# Altium footprint library Vibration_Datalogger.PcbLib: 76 footprints (part 5 of 5)
Each footprint in its own frame and in the unit in brackets; x right, y up, seen from the top. Pads: shape width x height; smd on the part's side, far side on the other; paste and mask are expansions set on the pad; w line width, h text height; cw(c..) or ccw(c..) is an arc to the next point about the centre after c.
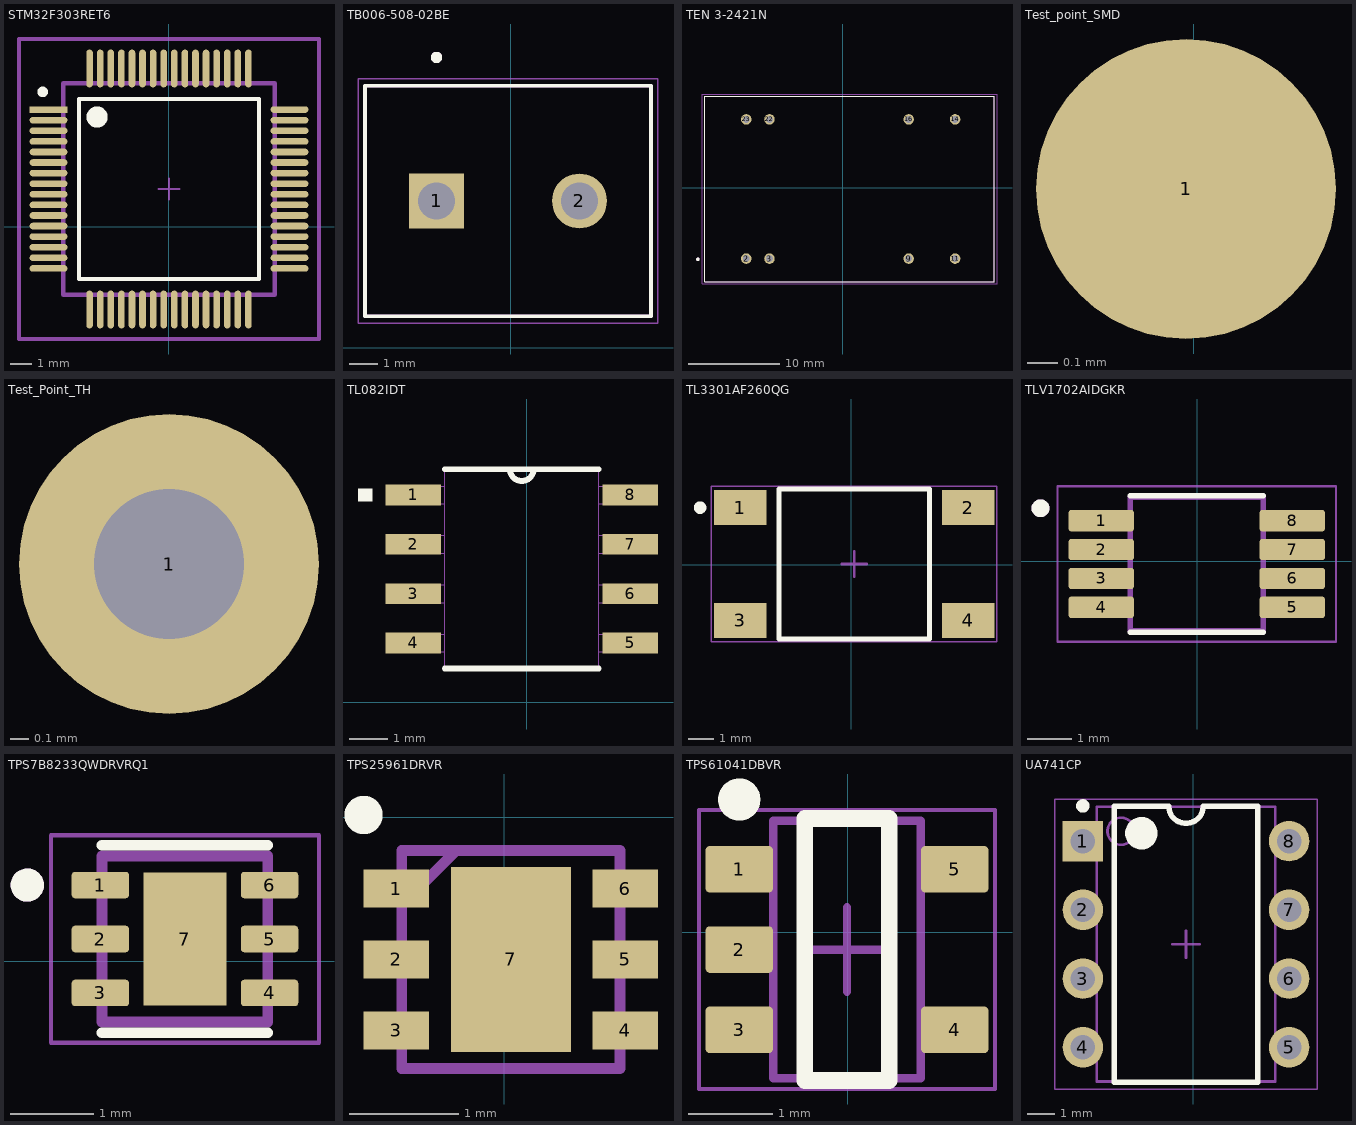
[diagram p4: the footprints below, top view; thin cyan lines are the x and y axes]

## STM32F303RET6 [mm]
pads (64):
  rect 1.788x0.312 smd paste+0 mask+0: 1(-5.683,5.543)
  rrect100% 1.788x0.312 smd paste+0 mask+0: 2(-5.683,5.043) 3(-5.683,4.543) 4(-5.683,4.043) 5(-5.683,3.543) 6(-5.683,3.043) 7(-5.683,2.543) 8(-5.683,2.043) 9(-5.683,1.543) 10(-5.683,1.043) 11(-5.683,0.543) 12(-5.683,0.043) 13(-5.683,-0.457) 14(-5.683,-0.957) 15(-5.683,-1.457) 16(-5.683,-1.957) 33(5.699,-1.957) 34(5.699,-1.457) 35(5.699,-0.957) 36(5.699,-0.457) 37(5.699,0.043) 38(5.699,0.543) 39(5.699,1.043) 40(5.699,1.543) 41(5.699,2.043) 42(5.699,2.543) 43(5.699,3.043) 44(5.699,3.543) 45(5.699,4.043) 46(5.699,4.543) 47(5.699,5.043) 48(5.699,5.543)
  rrect100% 0.312x1.788 smd paste+0 mask+0: 17(-3.742,-3.898) 18(-3.242,-3.898) 19(-2.742,-3.898) 20(-2.242,-3.898) 21(-1.742,-3.898) 22(-1.242,-3.898) 23(-0.742,-3.898) 24(-0.242,-3.898) 25(0.258,-3.898) 26(0.758,-3.898) 27(1.258,-3.898) 28(1.758,-3.898) 29(2.258,-3.898) 30(2.758,-3.898) 31(3.258,-3.898) 32(3.758,-3.898) 49(3.758,7.484) 50(3.258,7.484) 51(2.758,7.484) 52(2.258,7.484) 53(1.758,7.484) 54(1.258,7.484) 55(0.758,7.484) 56(0.258,7.484) 57(-0.242,7.484) 58(-0.742,7.484) 59(-1.242,7.484) 60(-1.742,7.484) 61(-2.242,7.484) 62(-2.742,7.484) 63(-3.242,7.484) 64(-3.742,7.484)
Top Overlay:
  circle w0.25: c-5.958,6.378 r0.125
  circle w0.5: c-3.392,5.193 r0.25
  lines w0.2: -4.242,-2.457 4.258,-2.457 4.258,6.043 -4.242,6.043 -4.242,-2.457
Mechanical 5:
  lines w0.2: -7.077,-5.292 7.093,-5.292 7.093,8.878 -7.077,8.878 -7.077,-5.292
  text ".Designator" at 0.008,1.792 h1
Mechanical 13:
  lines w0.2: -4.992,-3.207 5.008,-3.207 5.008,6.793 -4.992,6.793 -4.992,-3.207
Mechanical 15:
  lines w0.2: -7.077,-5.292 7.093,-5.292 7.093,8.878 -7.077,8.878 -7.077,-5.292
Mechanical 16:
  lines w0.1: -0.492,1.793 0.508,1.793 ; 0.008,1.293 0.008,2.293
3D body "IC_STMicroelectronics_STM32F303RET6_eec.STEP": height 0.25, standoff 0, extent -7.077,-5.292 7.093,8.878

## TB006-508-02BE [mm] "Borniers fixes Terminal block, screw type, 5.08"
pads (2):
  rect 1.95x1.95 / inner round 1.95 / far side rect 1.95x1.95 hole 1.3: 1(-2.644,5.208)
  round 1.95 hole 1.3: 2(2.436,5.208)
Top Overlay:
  circle w0.2: c-2.644,10.308 r0.1
  lines w0.127: -5.184,1.108 4.976,1.108 4.976,9.308 -5.184,9.308 -5.184,1.108
Mechanical 13:
  circle w0.2: c-2.644,10.308 r0.1
  lines w0.127: -5.184,1.108 4.976,1.108 4.976,9.308 -5.184,9.308 -5.184,1.108
Mechanical 15:
  lines w0.05: -5.434,0.858 -5.434,9.558 5.226,9.558 5.226,0.858 -5.434,0.858
3D body "step_temp.STEP": height 10.48, standoff -3.32, extent -5.561,1.017 5.099,9.217

## TEN 3-2421N [mm] "DC DC CONVERTER +/-5V 2.5W"
pads (8):
  round 1.15 hole 0.75: 2(-10.541,-7.747) 3(-8.001,-7.747) 9(7.239,-7.747) 11(12.319,-7.747) 14(12.319,7.493) 16(7.239,7.493) 22(-8.001,7.493) 23(-10.541,7.493)
Top Overlay:
  circle w0.2: c-15.838,-7.827 r0.1
  lines w0.127: -15.113,-10.287 -15.113,10.033 16.637,10.033 16.637,-10.287 -15.113,-10.287
Mechanical 13:
  circle w0.2: c-15.838,-7.827 r0.1
  lines w0.127: -15.113,-10.287 -15.113,10.033 16.637,10.033 16.637,-10.287 -15.113,-10.287
Mechanical 15:
  lines w0.05: -15.388,-10.527 16.912,-10.527 16.912,10.273 -15.388,10.273 -15.388,-10.527
3D body "TEN 3-2421N.STEP": height 10.2, standoff -4.5, extent -14.884,-10.15 16.916,10.15

## Test_point_SMD [mm]
pads (1):
  round 1 smd: 1(-0.027,2.283)

## Test_Point_TH [mm]
pads (1):
  round 1.6 hole 0.8: 1(3.588,48.418)

## TL082IDT [mil] "J-FET Amplifier 2 Circuit - 8-SOIC"
pads (8):
  rect 56x21 smd: 1(-115,210) 2(-115,160) 3(-115,110) 4(-115,60) 5(105,60) 6(105,110) 7(105,160) 8(105,210)
Top Overlay:
  rectangle: -170.87,203.15 -156.3,216.54
  lines w6: -83,34 73,34 ; -83,236 -17,236 ; 73,236 7,236 ; -17,236 ccw(c-5,236) 7,236 ; -17,236 7,236
Mechanical 13:
  lines w0: -17,236 ccw(c-5,236) 7,236 ; -17,236 -83,236 -83,34 73,34 73,236 7,236 ; -17,236 7,236 ; -129,51 -83,51 -83,69 -129,69 -129,51 ; -129,101 -83,101 -83,119 -129,119 -129,101 ; -129,151 -83,151 -83,169 -129,169 -129,151 ; -129,201 -83,201 -83,219 -129,219 -129,201 ; 73,51 119,51 119,69 73,69 73,51 ; 73,101 119,101 119,119 73,119 73,101 ; 73,151 119,151 119,169 73,169 73,151 ; 73,201 119,201 119,219 73,219 73,201
3D body "step_temp.STEP": height 68.9, standoff 0, extent -123.11,38.54 113.11,231.46

## TL3301AF260QG [mm] "SWITCH TACTILE SPST-NO 0.05A 12V"
pads (4):
  rect 2.1x1.4 smd: 1(-4.434,2.277) 2(4.666,2.277) 3(-4.434,-2.223) 4(4.666,-2.223)
Top Overlay:
  circle w0.25: c-6.034,2.277 r0.125
  lines w0.2: -2.884,-2.973 3.116,-2.973 3.116,3.027 -2.884,3.027 -2.884,-2.973
Mechanical 13:
  lines w0.1: -2.884,-2.973 -2.884,3.027 3.116,3.027 3.116,-2.973 -2.884,-2.973
Mechanical 15:
  lines w0.05: -5.584,-3.073 5.816,-3.073 5.816,3.127 -5.584,3.127 -5.584,-3.073
  lines w0.1: -0.384,0.027 0.616,0.027 ; 0.116,-0.473 0.116,0.527
3D body: height 5.3, standoff 3.6, extent -1.634,-1.723 1.866,1.777
3D body: height 3.6, standoff 0, extent -2.884,-2.973 3.116,3.027

## TLV1702AIDGKR [mm] "IC COMPARATOR 2CH 8-VSSOP"
pads (8):
  rrect25% 1.47x0.48 smd paste+0 mask+0.102: 1(-2.162,0.916) 2(-2.162,0.266) 3(-2.162,-0.384) 4(-2.162,-1.034) 5(2.138,-1.034) 6(2.138,-0.384) 7(2.138,0.266) 8(2.138,0.916)
Top Overlay:
  circle w0.2: c-3.532,1.196 r0.1
  lines w0.127: -1.512,-1.594 1.488,-1.594 ; -1.512,1.476 1.488,1.476
Mechanical 13:
  circle w0.2: c-3.532,1.196 r0.1
  lines w0.127: -1.512,-1.559 -1.512,1.441 1.488,1.441 1.488,-1.559 -1.512,-1.559
Mechanical 15:
  lines w0.05: -3.147,-1.809 -3.147,1.691 3.123,1.691 3.123,-1.809 -3.147,-1.809
3D body "step_temp.STEP": height 1.1, standoff 0, extent -2.462,-1.559 2.438,1.441

## TPS7B8233QWDRVRQ1 [mm] "AUTOMOTIVE 300-MA, OFF-BATTERY ("
pads (7):
  rrect25% 0.69x0.32 smd: 1(-3.546,0.92) 2(-3.546,0.27) 3(-3.546,-0.38) 4(-1.506,-0.38) 5(-1.506,0.27) 6(-1.506,0.92)
  rect 1x1.6 smd paste-2: 7(-2.526,0.27)
Top Overlay:
  circle w0.2: c-4.426,0.92 r0.1
  lines w0.127: -3.526,-0.86 -1.526,-0.86 ; -3.526,1.4 -1.526,1.4
Top Paste:
  region: -2.21,-0.236 -2.842,-0.236 -2.842,0.776 -2.21,0.776
Mechanical 13:
  circle w0.2: c-4.426,0.92 r0.1
  lines w0.127: -3.526,-0.73 -1.526,-0.73 -1.526,1.27 -3.526,1.27 -3.526,-0.73
Mechanical 15:
  lines w0.05: -4.141,-0.98 -0.911,-0.98 -0.911,1.52 -4.141,1.52 -4.141,-0.98
3D body "step_temp.STEP": height 0.8, standoff 0, extent -3.526,-0.73 -1.526,1.27

## TPS25961DRVR [mm] "2.7-V TO 19-V 100-M EFUSE WITH O"
pads (7):
  rect 0.6x0.35 smd: 1(-0.99,-0.653) 2(-0.99,-1.303) 3(-0.99,-1.953) 4(1.11,-1.953) 5(1.11,-1.303) 6(1.11,-0.653)
  rect 1.1x1.7 smd: 7(0.06,-1.303)
Top Overlay:
  circle w0.25: c-1.29,0.022 r0.051
Mechanical 15:
  lines w0.1: -0.94,-0.803 -0.44,-0.303 ; -0.94,-2.303 1.06,-2.303 1.06,-0.303 -0.94,-0.303 -0.94,-2.303
3D body "TPS25961DRVR.stp": height 0.8, standoff 0, extent -0.99,-2.303 1.11,-0.303

## TPS61041DBVR [mm] "IC LED DRVR RGLTR PWM SOT23-5"
pads (5):
  rrect18% 0.8x0.55 smd: 1(-1.284,0.745) 2(-1.284,-0.205) 3(-1.284,-1.155) 4(1.266,-1.155) 5(1.266,0.745)
Top Overlay:
  circle w0.25: c-1.284,1.57 r0.125
  lines w0.2: -0.509,-1.755 0.491,-1.755 0.491,1.345 -0.509,1.345 -0.509,-1.755
Mechanical 1:
  text ".Designator" at -1.914,1.954 h0.4
Mechanical 13:
  lines w0.1: -0.884,-1.73 -0.884,1.32 0.866,1.32 0.866,-1.73 -0.884,-1.73
Mechanical 15:
  lines w0.05: -1.759,-1.855 -1.759,1.445 1.741,1.445 1.741,-1.855 -1.759,-1.855
  lines w0.1: -0.509,-0.205 0.491,-0.205 ; -0.009,-0.705 -0.009,0.295
3D body "DBV0005AaksMF05A.stp": height 1.08, standoff -0.01, extent -1.431,-1.666 1.413,1.255

## UA741CP [mm] "IC OPAMP GP 1 CIRCUIT 8DIP"
pads (8):
  rect 1.5x1.5 hole 0.9: 1(-4.075,11.828)
  round 1.5 hole 0.9: 2(-4.075,9.288) 3(-4.075,6.748) 4(-4.075,4.208) 5(3.545,4.208) 6(3.545,6.748) 7(3.545,9.288) 8(3.545,11.828)
Top Overlay:
  circle w0.25: c-4.075,13.128 r0.125
  circle w0.6: c-1.915,12.118 r0.3
  lines w0.2: -2.915,2.918 -2.915,13.118 -0.9,13.118 ccw(c-0.265,13.118) 0.37,13.118 2.385,13.118 2.385,2.918 -2.915,2.918
Mechanical 1:
  text ".Designator" at -5.599,14.114 h1.02
Mechanical 13:
  circle w0.1: c-2.665,12.193 r0.5
  lines w0.1: -3.565,2.943 -3.565,13.093 3.035,13.093 3.035,2.943 -3.565,2.943
Mechanical 15:
  lines w0.05: -5.115,2.668 -5.115,13.368 4.585,13.368 4.585,2.668 -5.115,2.668
  lines w0.1: -0.765,8.018 0.235,8.018 ; -0.265,7.518 -0.265,8.518
3D body: height 2.66, standoff 0, extent -4.21,11.328 -3.94,12.328
3D body: height 2.93, standoff 2.66, extent -4.21,11.328 -3.565,12.328
3D body: height 0, standoff -1.6, extent -4.21,11.468 -3.94,12.188
3D body: height 2.66, standoff 0, extent -4.21,8.788 -3.94,9.788
3D body: height 2.93, standoff 2.66, extent -4.21,8.788 -3.565,9.788
3D body: height 0, standoff -1.6, extent -4.21,8.928 -3.94,9.648
3D body: height 2.66, standoff 0, extent -4.21,6.248 -3.94,7.248
3D body: height 2.93, standoff 2.66, extent -4.21,6.248 -3.565,7.248
3D body: height 0, standoff -1.6, extent -4.21,6.388 -3.94,7.108
3D body: height 2.66, standoff 0, extent -4.21,3.708 -3.94,4.708
3D body: height 2.93, standoff 2.66, extent -4.21,3.708 -3.565,4.708
3D body: height 0, standoff -1.6, extent -4.21,3.848 -3.94,4.568
3D body: height 2.66, standoff 0, extent 3.41,3.708 3.68,4.708
3D body: height 2.93, standoff 2.66, extent 3.035,3.708 3.68,4.708
3D body: height 0, standoff -1.6, extent 3.41,3.848 3.68,4.568
3D body: height 2.66, standoff 0, extent 3.41,6.248 3.68,7.248
3D body: height 2.93, standoff 2.66, extent 3.035,6.248 3.68,7.248
3D body: height 0, standoff -1.6, extent 3.41,6.388 3.68,7.108
3D body: height 2.66, standoff 0, extent 3.41,8.788 3.68,9.788
3D body: height 2.93, standoff 2.66, extent 3.035,8.788 3.68,9.788
3D body: height 0, standoff -1.6, extent 3.41,8.928 3.68,9.648
3D body: height 2.66, standoff 0, extent 3.41,11.328 3.68,12.328
3D body: height 2.93, standoff 2.66, extent 3.035,11.328 3.68,12.328
3D body: height 0, standoff -1.6, extent 3.41,11.468 3.68,12.188
3D body: height 5.08, standoff 0.51, extent -3.565,2.943 3.035,13.093